# EAGLE library part BN43-202_BRIDGE (library HansToroid)
BN43-202 SWR bridge
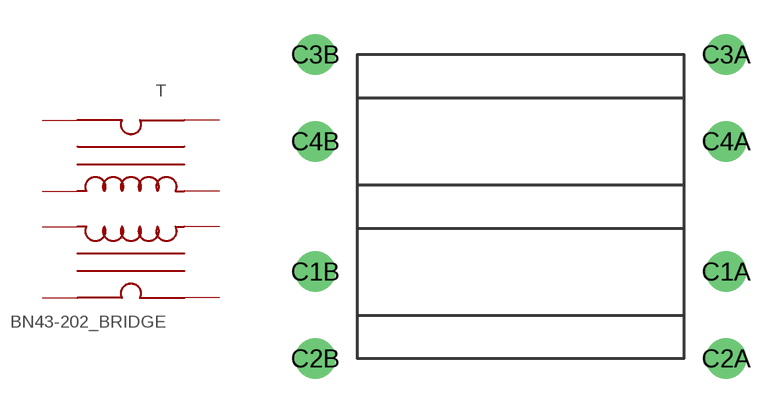
[diagram p2: symbol with the pads of BN43-202_BRIDGE; footprint BN43-202_BRIDGE]

Designator prefix T

## BN43-202_BRIDGE  [BN43-202_BRIDGE]
C1A  C1A
C1B  C1B
C2A  C2A
C2B  C2B
C3A  C3A
C3B  C3B
C4A  C4A
C4B  C4B

## Footprint BN43-202_BRIDGE (pad centres in mm)
Transformer on T50 Core, having two windings.
drill 0.6 pad 1.778: C1A 9.017,-2.857; C1B -9.017,-2.857; C2A 9.017,-6.668; C2B -9.017,-6.668; C3A 9.017,6.668; C3B -9.017,6.668; C4A 9.017,2.857; C4B -9.017,2.857